# EAGLE library part CON_HEADER_2X20 (library dp_devices.v6)
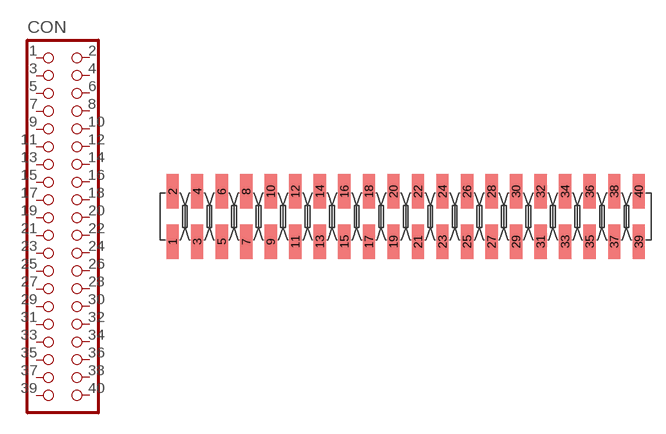
[diagram p153: symbol with the pads of M2X20_SMD; footprint M2X20_SMD]

Designator prefix CON

## CON_HEADER_2X20-SMD  [M2X20_SMD]
1  1  pas
2  2  pas
3  3  pas
4  4  pas
5  5  pas
6  6  pas
7  7  pas
8  8  pas
9  9  pas
10  10  pas
11  11  pas
12  12  pas
13  13  pas
14  14  pas
15  15  pas
16  16  pas
17  17  pas
18  18  pas
19  19  pas
20  20  pas
21  21  pas
22  22  pas
23  23  pas
24  24  pas
25  25  pas
26  26  pas
27  27  pas
28  28  pas
29  29  pas
30  30  pas
31  31  pas
32  32  pas
33  33  pas
34  34  pas
35  35  pas
36  36  pas
37  37  pas
38  38  pas
39  39  pas
40  40  pas

## Footprint M2X20_SMD (pad centres in mm)
2x20 Straight male header SMD Mfr no:M20-8762042
smd 1.27 x 3.56: 1 -24.13,-2.605; 2 -24.13,2.605; 3 -21.59,-2.605; 4 -21.59,2.605; 5 -19.05,-2.605; 6 -19.05,2.605; 7 -16.51,-2.605; 8 -16.51,2.605; 9 -13.97,-2.605; 10 -13.97,2.605; 11 -11.43,-2.605; 12 -11.43,2.605; 13 -8.89,-2.605; 14 -8.89,2.605; 15 -6.35,-2.605; 16 -6.35,2.605; 17 -3.81,-2.605; 18 -3.81,2.605; 19 -1.27,-2.605; 20 -1.27,2.605; 21 1.27,-2.605; 22 1.27,2.605; 23 3.81,-2.605; 24 3.81,2.605; 25 6.35,-2.605; 26 6.35,2.605; 27 8.89,-2.605; 28 8.89,2.605; 29 11.43,-2.605; 30 11.43,2.605; 31 13.97,-2.605; 32 13.97,2.605; 33 16.51,-2.605; 34 16.51,2.605; 35 19.05,-2.605; 36 19.05,2.605; 37 21.59,-2.605; 38 21.59,2.605; 39 24.13,-2.605; 40 24.13,2.605